# Altium schematic symbol library Components - 01.04.26 - 16.12.SchLib: 1 symbol
Pins are listed as number, name and electrical type; pins without a type are passive.

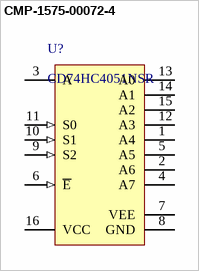
[diagram p0: symbol CMP-1575-00072-4]

## CMP-1575-00072-4
designator U?, comment CD74HC4051NSR
High Speed CMOS 8-Channel Analog Multiplexer/Demultiplexer, NS0016A, LARGE T&R; Manufacturer: Texas Instruments; Bandwidth(Max)(MHz): 180; VCC(Max)(V): 6; Ron(Typ)(Ohms): 45; Configuration: 1 X 1：8 MUX; Rating: Catalog; Ron(Max)(Ohms): 130; VCC(Min)(V): 2; Crosstalk: Yes; DatasheetVersion: SCHS122J; Generic Part Number: CD74HC4051; PackageReference: NS0016A; Operating Temperature Range(C): -55 to 125; PackageVersion: http://www.ti.com/lit/ml/msop002a/msop002a.pdf; Output Type: CMOS
footprint NS0016A_L (SOIC,16-Leads,Body 10.5x5.6mm,Pitch 1.27mm,IPC High Density)
footprint NS0016A_N (SOIC,16-Leads,Body 10.5x5.6mm,Pitch 1.27mm,IPC Medium Density)
footprint NS0016A_M (SOIC,16-Leads,Body 10.5x5.6mm,Pitch 1.27mm,IPC Low Density)
pins: 1 A4, 2 A6, 3 A, 4 A7, 5 A5, 6 ~{E} (in), 7 VEE (power), 8 GND (power), 9 S2 (in), 10 S1 (in), 11 S0 (in), 12 A3, 13 A0, 14 A1, 15 A2, 16 VCC (power)